# Altium footprint library iMX6 Rex Development Baseboard V1I1_PCB.PcbLib: 77 footprints (part 4 of 5)
Each footprint in its own frame and in the unit in brackets; x right, y up, seen from the top. Pads: shape width x height; smd on the part's side, far side on the other; paste and mask are expansions set on the pad; w line width, h text height; cw(c..) or ccw(c..) is an arc to the next point about the centre after c.
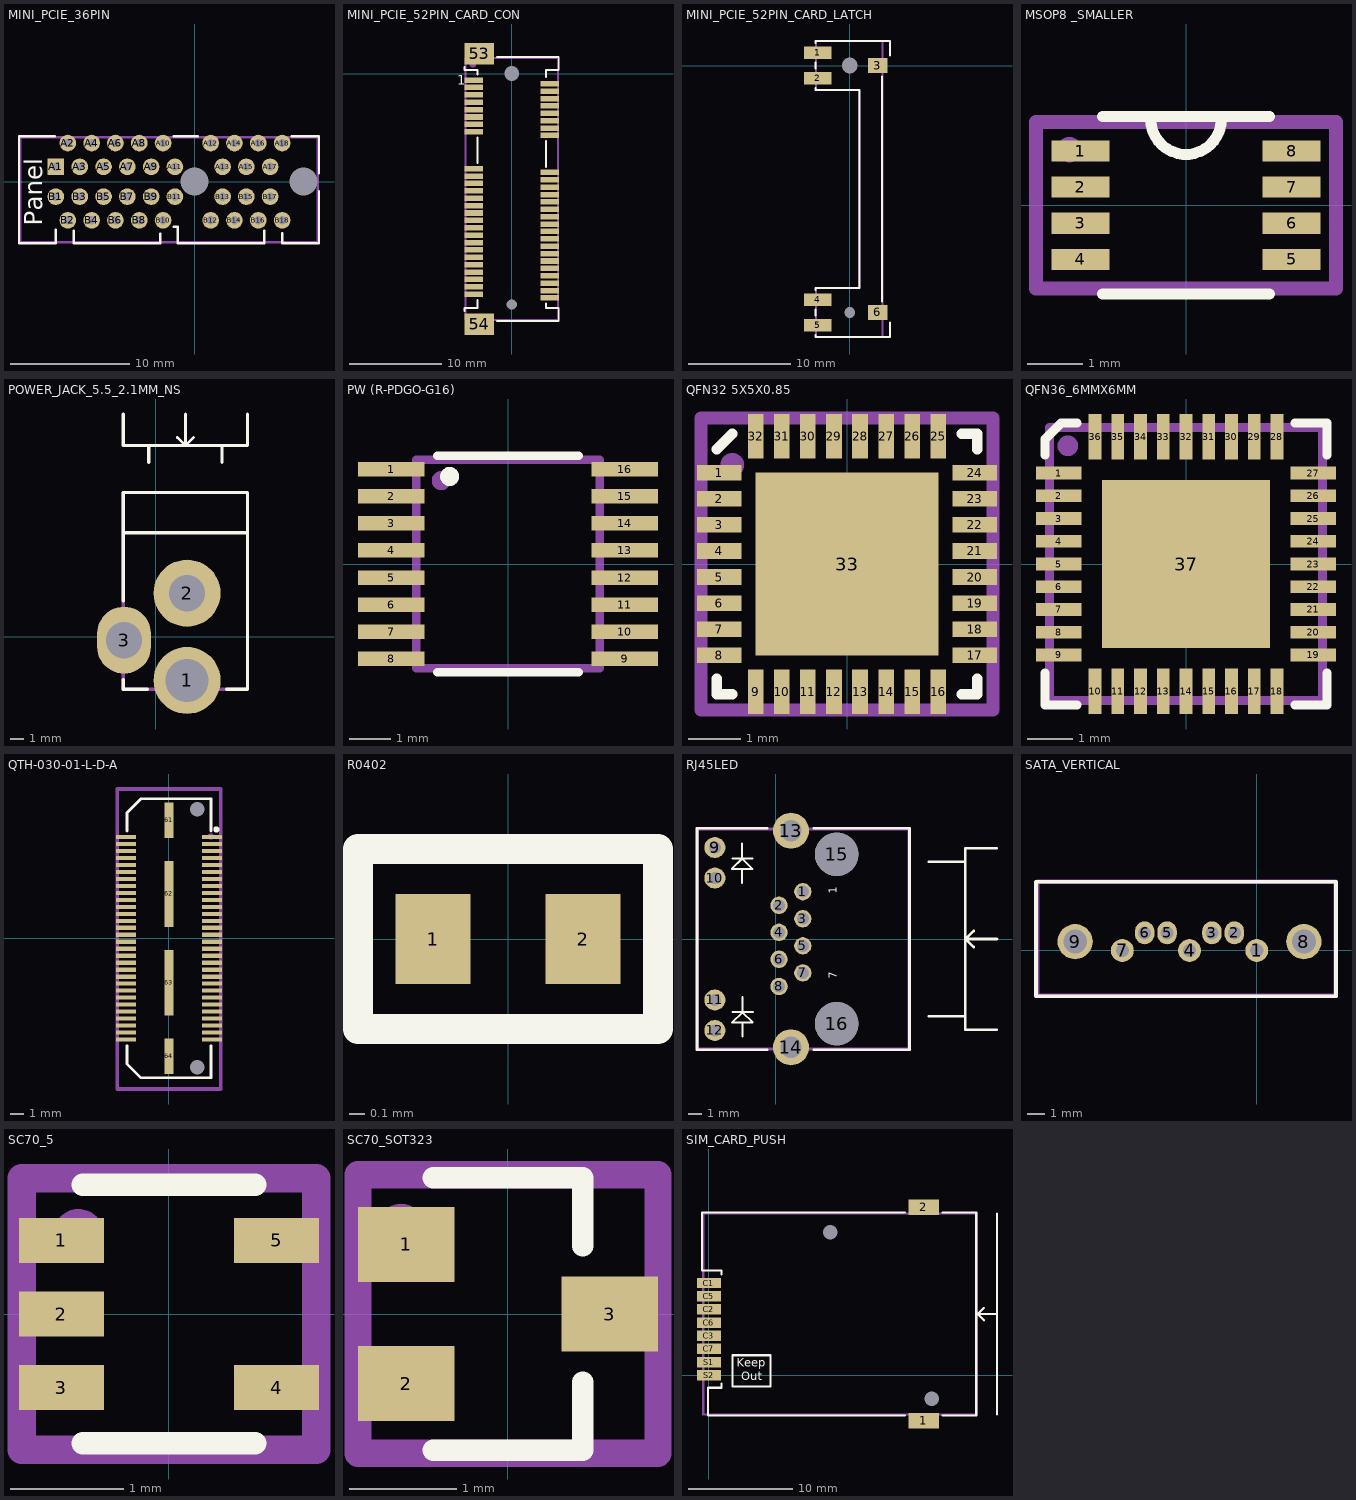
[diagram p3: the footprints below, top view; thin cyan lines are the x and y axes]

## MINI_PCIE_36PIN [mm]
pads (38):
  rrect70% 0x0 hole 2.35: 1(0,0) 2(9.15,0)
  rect 1.4x1.4 hole 0.7: A1(-11.65,1.25)
  round 1.4 hole 0.7: A2(-10.65,3.25) A3(-9.65,1.25) A4(-8.65,3.25) A5(-7.65,1.25) A6(-6.65,3.25) A7(-5.65,1.25) A8(-4.65,3.25) A9(-3.65,1.25) A10(-2.65,3.25) A11(-1.65,1.25) A12(1.35,3.25) A13(2.35,1.25) A14(3.35,3.25) A15(4.35,1.25) A16(5.35,3.25) A17(6.35,1.25) A18(7.35,3.25) B1(-11.65,-1.25) B2(-10.65,-3.25) B3(-9.65,-1.25) B4(-8.65,-3.25) B5(-7.65,-1.25) B6(-6.65,-3.25) B7(-5.65,-1.25) B8(-4.65,-3.25) B9(-3.65,-1.25) B10(-2.65,-3.25) B11(-1.65,-1.25) B12(1.35,-3.25) B13(2.35,-1.25) B14(3.35,-3.25) B15(4.35,-1.25) B16(5.35,-3.25) B17(6.35,-1.25) B18(7.35,-3.25)
Top Overlay:
  lines w0.2: -11.75,3.825 -14.75,3.825 -14.75,-5.175 -11.65,-5.175 -11.65,-4.025 ; -10.15,-4.125 -10.15,-5.175 -2.9,-5.175 -2.9,-4.375 ; -1.75,-3.775 -1.4,-3.775 -1.4,-5.175 5.85,-5.175 5.85,-4.125 ; -1.75,3.825 0.25,3.825 ; 7.35,-4.325 7.35,-5.175 10.45,-5.175 10.45,-0.8 ; 8.15,3.825 10.45,3.825 10.45,0.7
  text "Panel" at -12.8,-3.7 h1.5
Mechanical 16:
  lines w0.2: -14.65,-5.075 -14.65,3.725 10.35,3.725 10.35,-5.075 -14.65,-5.075
Mechanical 29:
  text ".Designator" at -0.5,0.3 h1.52
3D body "c-4-1612163-1-h-3d.stp": height 10, standoff -5.4, extent -14.65,-5.1 10.35,3.6

## MINI_PCIE_52PIN_CARD_CON [mm]
pads (56):
  rect 2x0.6 smd mask+0.05: 1(-4.1,-0.7) 2(4.1,-1.1) 3(-4.1,-1.5) 4(4.1,-1.9) 5(-4.1,-2.3) 6(4.1,-2.7) 7(-4.1,-3.1) 8(4.1,-3.5) 9(-4.1,-3.9) 10(4.1,-4.3) 11(-4.1,-4.7) 12(4.1,-5.1) 13(-4.1,-5.5) 14(4.1,-5.9) 15(-4.1,-6.3) 16(4.1,-6.7) 17(-4.1,-10.3) 18(4.1,-10.7) 19(-4.1,-11.1) 20(4.1,-11.5) 21(-4.1,-11.9) 22(4.1,-12.3) 23(-4.1,-12.7) 24(4.1,-13.1) 25(-4.1,-13.5) 26(4.1,-13.9) 27(-4.1,-14.3) 28(4.1,-14.7) 29(-4.1,-15.1) 30(4.1,-15.5) 31(-4.1,-15.9) 32(4.1,-16.3) 33(-4.1,-16.7) 34(4.1,-17.1) 35(-4.1,-17.5) 36(4.1,-17.9) 37(-4.1,-18.3) 38(4.1,-18.7) 39(-4.1,-19.1) 40(4.1,-19.5) 41(-4.1,-19.9) 42(4.1,-20.3) 43(-4.1,-20.7) 44(4.1,-21.1) 45(-4.1,-21.5) 46(4.1,-21.9) 47(-4.1,-22.3) 48(4.1,-22.7) 49(-4.1,-23.1) 50(4.1,-23.5) 51(-4.1,-23.9) 52(4.1,-24.3)
  rect 3.2x2.3 smd: 53(-3.5,2.15) 54(-3.5,-27.15)
  rrect70% 0x0 hole 1.6: 55(0,0)
  rrect70% 0x0 hole 1.1: 56(0,-25)
Top Overlay:
  lines w0.2: -5.1,-25.7 -5.1,-25.4 -3.7,-25.4 -3.7,-24.5 ; -5.1,0.7 -5.1,0.4 -3.7,0.4 -3.7,-0.1 ; -3.7,-9.7 -3.7,-6.9 ; -1.6,-26.8 5.1,-26.8 5.1,-25.4 3.7,-25.4 3.7,-24.9 ; -1.6,1.8 5.1,1.8 5.1,0.4 3.7,0.4 3.7,-0.4 ; 3.7,-10.1 3.7,-7.3
  text "1" at -5.9,-1.2 h1.02
Mechanical 16:
  circle w0.5: c-4.2,1 r0.1
  lines w0.2: -5,-26.7 5,-26.7 5,1.7 -5,1.7 -5,-26.7
Mechanical 29:
  text ".Designator" at -0.6,-10.9 h1.52
3D body "K3D-MM60-52B1-E1-R2 JAE Connector Division Proprietary.STEP": height 5.95, standoff -0.75, extent -5,-27.35 5,2.35

## MINI_PCIE_52PIN_CARD_LATCH [mm]
pads (8):
  rect 2.7x1.2 smd: 1(-3.15,1.25) 2(-3.15,-1.25) 4(-3.15,-22.95) 5(-3.15,-25.45)
  rect 1.9x1.5 smd: 3(2.75,0) 6(2.75,-24.2)
  rrect70% 0x0 hole 1.55: 7(0,0)
  rrect70% 0x0 hole 1.05: 8(0,-24.2)
Top Overlay:
  lines w0.2: -3.35,-26.4 -3.35,-26.6 3.95,-26.6 3.95,-25.2 ; -3.35,-24.5 -3.35,-23.9 ; -3.35,-22 -3.35,-21.8 0.95,-21.8 0.95,-2.4 -3.35,-2.4 -3.35,-2.2 ; -3.35,-0.3 -3.35,0.3 ; -3.35,2.2 -3.35,2.4 3.95,2.4 3.95,1 ; 3.15,-23.1 3.15,-1.1
Mechanical 16:
  lines w0.2: -3.3,-26.6 3.2,-26.6 3.2,2.4 -3.3,2.4 -3.3,-2.4 0.9,-2.4 0.9,-21.8 -3.3,-21.8 -3.3,-26.6
Mechanical 29:
  text ".Designator" at 1.5,-11.1 h1
3D body "K3D-MM60-EZH059-B5-R2 JAE Connector Division Proprietary.STEP": height 6.7, standoff -0.9, extent -3.95,-26.6 3.95,2.4

## MINI_PCIE_FULL CARD [mm]
3D body "PCI Express Mini Card (Full-Mini Card).step": height 6.9, standoff 2.15, extent 0,0 50.95,30

## MSOP8 _SMALLER [mm]
pads (8):
  rect 1.04x0.38 smd mask+0.076: 1(-1.9,0.975) 2(-1.9,0.325) 3(-1.9,-0.325) 4(-1.9,-0.975) 5(1.9,-0.975) 6(1.9,-0.325) 7(1.9,0.325) 8(1.9,0.975)
Top Overlay:
  lines w0.2: -1.5,-1.6 1.5,-1.6 ; -1.5,1.6 1.5,1.6 ; -0.635,1.549 ccw(c0,1.549) 0.635,1.549
Mechanical 16:
  circle w0.254: c-2.1,1 r0.1
  lines w0.254: -2.7,-1.5 2.7,-1.5 2.7,1.5 -2.7,1.5 -2.7,-1.5
Mechanical 29:
  text ".Designator" at 1,0.4 h1
3D body: height 0.9, standoff 0, extent -1.5,-1.6 1.5,1.6

## POWER_JACK_5.5_2.1MM_NS [mm]
pads (3):
  round 5 hole 3.2: 1(2.35,-3.25)
  round 5 hole 2.7: 2(2.35,3.25)
  oval 4x5 hole 2.7: 3(-2.35,-0.25)
Top Overlay:
  lines w0.2: 1.625,14.85 2.225,14.25 ; 2.225,16.6 2.225,14.25 ; 2.825,14.85 2.225,14.25
  lines w0.254: -2.4,-3.2 -2.4,-3.9 -0.6,-3.9 ; -2.4,2.7 -2.4,10.75 6.85,10.75 6.85,-3.9 5.3,-3.9 ; -2.4,7.75 6.85,7.75 ; -2.4,16.6 -2.4,14.25 6.85,14.25 6.85,16.6 ; -0.5,13 -0.5,14.25 ; 4.95,13 4.95,14.25
Mechanical 16:
  lines w0.254: -2.4,-3.9 -2.4,10.75 6.85,10.75 6.85,-3.9 -2.4,-3.9
Mechanical 29:
  text ".Designator" at -0.27,1.34 h1.52
3D body "CUI-PJ-002AH.step": height 11, standoff -3.5, extent -2.55,-3.9 6.85,10.5

## PW (R-PDGO-G16) [mm]
pads (16):
  rect 1.6x0.35 smd mask+0.07: 1(-2.8,2.275) 2(-2.8,1.625) 3(-2.8,0.975) 4(-2.8,0.325) 5(-2.8,-0.325) 6(-2.8,-0.975) 7(-2.8,-1.625) 8(-2.8,-2.275) 9(2.8,-2.275) 10(2.8,-1.625) 11(2.8,-0.975) 12(2.8,-0.325) 13(2.8,0.325) 14(2.8,0.975) 15(2.8,1.625) 16(2.8,2.275)
Top Overlay:
  circle w0.254: c-1.4,2.1 r0.1
  lines w0.2: -1.7,-2.6 1.7,-2.6 ; -1.7,2.6 1.7,2.6
Mechanical 16:
  circle w0.254: c-1.6,2 r0.1
  lines w0.2: -2.2,-2.5 -2.2,2.5 2.2,2.5 2.2,-2.5 -2.2,-2.5
Mechanical 29:
  text ".Designator" at 0.7,0.5 h1
3D body "mtc16.stp": height 0.99, standoff -0.01, extent -3.198,-2.5 3.222,2.5

## QFN32 5X5X0.85 [mm]
pads (33):
  rect 0.85x0.3 smd mask+0.025: 1(-2.45,1.75) 2(-2.45,1.25) 3(-2.45,0.75) 4(-2.45,0.25) 5(-2.45,-0.25) 6(-2.45,-0.75) 7(-2.45,-1.25) 8(-2.45,-1.75) 17(2.45,-1.75) 18(2.45,-1.25) 19(2.45,-0.75) 20(2.45,-0.25) 21(2.45,0.25) 22(2.45,0.75) 23(2.45,1.25) 24(2.45,1.75)
  rect 0.3x0.85 smd mask+0.025: 9(-1.75,-2.45) 10(-1.25,-2.45) 11(-0.75,-2.45) 12(-0.25,-2.45) 13(0.25,-2.45) 14(0.75,-2.45) 15(1.25,-2.45) 16(1.75,-2.45) 25(1.75,2.45) 26(1.25,2.45) 27(0.75,2.45) 28(0.25,2.45) 29(-0.25,2.45) 30(-0.75,2.45) 31(-1.25,2.45) 32(-1.75,2.45)
  rect 3.5x3.5 smd paste-10 mask+0.025: 33(0,0)
Top Overlay:
  lines w0.2: -2.5,-2.2 -2.5,-2.5 -2.2,-2.5 ; -2.5,2.2 -2.2,2.5 ; 2.2,-2.5 2.5,-2.5 2.5,-2.2 ; 2.2,2.5 2.5,2.5 2.5,2.2
Top Paste:
  rectangle: -1.7,0.1 -0.1,1.7
  region: 0.1,1.7 0.1,0.1 1.7,0.1 1.7,1.7
  region: -0.1,-1.7 -0.1,-0.1 -1.7,-0.1 -1.7,-1.7
  region: 1.7,-0.1 0.1,-0.1 0.1,-1.7 1.7,-1.7
Mechanical 16:
  circle w0.254: c-2.2,1.9 r0.1
  lines w0.254: -2.8,-2.8 -2.8,2.8 2.8,2.8 2.8,-2.8 -2.8,-2.8
Mechanical 29:
  text ".Designator" at 0.5,-1.2 h1.2
3D body: height 0.9, standoff 0, extent -2.5,-2.5 2.5,2.5

## QFN36_6MMX6MM [mm]
pads (37):
  rect 1x0.28 smd mask+0.025: 1(-2.8,2) 2(-2.8,1.5) 3(-2.8,1) 4(-2.8,0.5) 5(-2.8,0) 6(-2.8,-0.5) 7(-2.8,-1) 8(-2.8,-1.5) 9(-2.8,-2) 19(2.8,-2) 20(2.8,-1.5) 21(2.8,-1) 22(2.8,-0.5) 23(2.8,0) 24(2.8,0.5) 25(2.8,1) 26(2.8,1.5) 27(2.8,2)
  rect 0.28x1 smd mask+0.025: 10(-2,-2.8) 11(-1.5,-2.8) 12(-1,-2.8) 13(-0.5,-2.8) 14(0,-2.8) 15(0.5,-2.8) 16(1,-2.8) 17(1.5,-2.8) 18(2,-2.8) 28(2,2.8) 29(1.5,2.8) 30(1,2.8) 31(0.5,2.8) 32(0,2.8) 33(-0.5,2.8) 34(-1,2.8) 35(-1.5,2.8) 36(-2,2.8)
  rect 3.7x3.7 smd paste-10 mask+0.025: 37(0,0)
Top Overlay:
  lines w0.2: -3.1,-2.4 -3.1,-3.1 -2.4,-3.1 ; -3.1,2.4 -3.1,2.75 -2.75,3.1 -2.4,3.1 ; 2.4,-3.1 3.1,-3.1 3.1,-2.4 ; 2.4,3.1 3.1,3.1 3.1,2.4
Top Paste:
  rectangle: -1.7,0.1 -0.1,1.7
  region: -0.1,-1.7 -0.1,-0.1 -1.7,-0.1 -1.7,-1.7
  region: 1.7,-0.1 0.1,-0.1 0.1,-1.7 1.7,-1.7
  region: 0.1,1.7 0.1,0.1 1.7,0.1 1.7,1.7
Mechanical 16:
  circle w0.254: c-2.6,2.6 r0.1
  lines w0.2: -3,-3 -3,3 3,3 3,-3 -3,-3
Mechanical 29:
  text ".Designator" at -1.2,-0.6 h1.2
3D body "QFN36 (6x6).step": height 0.9, standoff 0.01, extent -3.103,-3.103 3.102,3.102

## QTH-030-01-L-D-A [mm]
pads (66):
  rect 1.45x0.3 smd mask+0.025: 1(3.09,7.25) 2(-3.09,7.25) 3(3.09,6.75) 4(-3.09,6.75) 5(3.09,6.25) 6(-3.09,6.25) 7(3.09,5.75) 8(-3.09,5.75) 9(3.09,5.25) 10(-3.09,5.25) 11(3.09,4.75) 12(-3.09,4.75) 13(3.09,4.25) 14(-3.09,4.25) 15(3.09,3.75) 16(-3.09,3.75) 17(3.09,3.25) 18(-3.09,3.25) 19(3.09,2.75) 20(-3.09,2.75) 21(3.09,2.25) 22(-3.09,2.25) 23(3.09,1.75) 24(-3.09,1.75) 25(3.09,1.25) 26(-3.09,1.25) 27(3.09,0.75) 28(-3.09,0.75) 29(3.09,0.25) 30(-3.09,0.25) 31(3.09,-0.25) 32(-3.09,-0.25) 33(3.09,-0.75) 34(-3.09,-0.75) 35(3.09,-1.25) 36(-3.09,-1.25) 37(3.09,-1.75) 38(-3.09,-1.75) 39(3.09,-2.25) 40(-3.09,-2.25) 41(3.09,-2.75) 42(-3.09,-2.75) 43(3.09,-3.25) 44(-3.09,-3.25) 45(3.09,-3.75) 46(-3.09,-3.75) 47(3.09,-4.25) 48(-3.09,-4.25) 49(3.09,-4.75) 50(-3.09,-4.75) 51(3.09,-5.25) 52(-3.09,-5.25) 53(3.09,-5.75) 54(-3.09,-5.75) 55(3.09,-6.25) 56(-3.09,-6.25) 57(3.09,-6.75) 58(-3.09,-6.75) 59(3.09,-7.25) 60(-3.09,-7.25)
  rect 0.64x2.54 smd mask+0.025: 61(0,8.445) 64(0,-8.445)
  rect 0.64x4.7 smd mask+0.025: 62(0,3.175) 63(0,-3.175)
  round 0 hole 1.05 unplated: 65(2.03,-9.24) 66(2.03,9.24)
Top Overlay:
  circle w0.254: c3.4,7.8 r0.1
  lines w0.2: -3,-7.7 -3,-9 -2,-10 3,-10 3,-7.7 ; -3,7.7 -3,9 -2,10 3,10 3,7.7
Mechanical 16:
  circle w0.254: c3,7.3 r0.1
  lines w0.254: -3.7,-10.8 -3.7,10.7 3.7,10.7 3.7,-10.8 -3.7,-10.8
Mechanical 29:
  text ".Designator" at 1.2,0 h1.52
3D body "QTH-030-01-X-D-A.step": height 4.26, standoff -0.74, extent -3.55,-10.002 3.562,10

## R0402 [mm]
pads (2):
  rect 0.5x0.6 smd: 1(-0.5,0) 2(0.5,0)
Top Overlay:
  lines w0.2: -1,-0.6 -1,0.6 1,0.6 1,-0.6 -1,-0.6
Mechanical 16:
  lines w0.15: -1,-0.6 1,-0.6 1,0.6 -1,0.6 -1,-0.6
Mechanical 29:
  text ".Designator" at 2,0.2 h0.4
3D body "R0402.step": height 0.4, standoff 0, extent -0.5,-0.25 0.5,0.25

## RJ45LED [mm]
pads (16):
  round 1.3 hole 0.9: 1(2.03,3.55) 2(0.25,2.53) 3(2.03,1.52) 4(0.25,0.5) 5(2.03,-0.51) 6(0.25,-1.52) 7(2.03,-2.54) 8(0.25,-3.56)
  round 1.575 hole 0.9: 9(-4.57,6.86) 10(-4.57,4.57) 11(-4.57,-4.57) 12(-4.57,-6.86)
  round 2.7 hole 1.6: 13(1.14,8.13) 14(1.14,-8.13)
  round 3.25 hole 3.25 unplated: 15(4.57,6.35) 16(4.57,-6.35)
Top Overlay:
  lines w0.15: -3.26,6.04 -1.74,6.04 ; -3.24,-5.48 -1.72,-5.48 ; -2.53,4.22 -2.53,5.26 ; -2.53,7.15 -2.53,6.03 -1.76,5.26 -3.29,5.26 -2.51,6.04 ; -2.51,-7.3 -2.51,-6.26 ; -2.51,-4.37 -2.51,-5.49 -1.74,-6.26 -3.27,-6.26 -2.49,-5.48
  lines w0.2: -0.66,-8.3 -5.91,-8.3 -5.91,8.3 -0.66,8.3 ; 2.86,-8.3 10.03,-8.3 10.03,8.3 2.86,8.3 ; 11.5,-5.8 14.23,-5.8 ; 11.5,5.8 14.23,5.8 ; 14.85,-0.6 14.25,0 ; 14.85,0.6 14.25,0 ; 16.58,-6.8 14.23,-6.8 14.23,6.8 16.58,6.8 ; 16.6,0 14.25,0
  text "7" at 4.58,-3 h0.6
  text "1" at 4.58,3.4 h0.6
Mechanical 16:
  lines w0.254: -5.87,-8.25 9.93,-8.25 10.03,-8.15 10.03,8.25 -5.87,8.25 -5.87,-8.25
Mechanical 29:
  text ".Designator" at 0.5,2 h1.52
3D body "c-2-406549-1-r4-3d.stp": height 14.8, standoff -3.92, extent -5.9,-9.3 10.821,9.328

## SATA_VERTICAL [mm]
pads (9):
  round 1.3 hole 0.74: 1(0,0) 4(-3.81,0) 7(-7.62,0)
  oval 1.1x1.3 hole 0.74: 2(-1.27,1) 3(-2.54,1) 5(-5.08,1) 6(-6.35,1)
  round 2 hole 1.35: 8(2.67,0.5) 9(-10.29,0.5)
Top Overlay:
  lines w0.2: -12.51,-2.6 -12.51,3.9 4.49,3.9 4.49,-2.6 -12.51,-2.6
Mechanical 16:
  lines w0.254: -12.43,-2.555 -12.43,3.895 4.47,3.895 4.47,-2.555 -12.43,-2.555
Mechanical 29:
  text ".Designator" at -5.5,-0.2 h1.52
3D body "471554001.stp": height 8.43, standoff -2.62, extent -12.43,-2.555 4.47,3.895

## SC70_5 [mm]
pads (5):
  rect 0.75x0.4 smd mask+0.025: 1(-0.95,0.65) 2(-0.95,0) 3(-0.95,-0.65) 4(0.95,-0.65) 5(0.95,0.65)
Top Overlay:
  lines w0.2: -0.762,-1.143 0.762,-1.143 ; -0.762,1.143 0.762,1.143
Mechanical 16:
  circle w0.254: c-0.8,0.7 r0.1
  lines w0.254: -1.3,-1.2 -1.3,1.2 1.3,1.2 1.3,-1.2 -1.3,-1.2
Mechanical 29:
  text ".Designator" at 0.4,-0.8 h0.6
3D body: height 0.8, standoff 0, extent 0.762,0.445 1.206,0.826
3D body: height 0.8, standoff 0, extent 0.762,-0.826 1.206,-0.445
3D body: height 0.8, standoff 0, extent -1.206,-0.826 -0.762,-0.445
3D body: height 0.8, standoff 0, extent -1.206,-0.191 -0.762,0.191
3D body: height 0.8, standoff 0, extent -1.206,0.445 -0.762,0.826
3D body: height 1.1, standoff 0, extent -0.762,-1.143 0.762,1.143

## SC70_SOT323 [mm]
pads (3):
  rect 0.9x0.7 smd: 1(-0.95,0.65) 2(-0.95,-0.65) 3(0.95,0)
Top Overlay:
  lines w0.2: -0.699,-1.27 0.699,-1.27 0.699,-0.635 ; -0.699,1.27 0.699,1.27 0.699,0.635
Mechanical 16:
  circle w0.254: c-1,0.8 r0.1
  lines w0.254: -1.4,-1.3 -1.4,1.3 1.4,1.3 1.4,-1.3 -1.4,-1.3
Mechanical 29:
  text ".Designator" at 0.3,-0.4 h0.6
3D body: height 0.75, standoff 0, extent 0.699,-0.318 1.27,0.381
3D body: height 0.75, standoff 0, extent -1.27,-1.016 -0.699,-0.318
3D body: height 0.75, standoff 0, extent -1.27,0.318 -0.699,1.016
3D body: height 1.1, standoff 0, extent -0.699,-1.27 0.699,1.27

## SIM_CARD_PUSH [mm]
pads (12):
  rect 2.95x1.5 smd: 1(20.7,-4.37) 2(20.7,16.18)
  rrect70% 0x0 hole 1.4: 3(21.47,-2.26) 4(11.67,13.79)
  rect 2.3x1 smd mask+0.051: C1(0,8.89) C2(0,6.35) C3(0,3.81) C5(0,7.62) C6(0,5.08) C7(0,2.54) S1(0,1.27) S2(0,0)
Top Overlay:
  lines w0.2: 1.19,9.71 1.19,10.1 -0.65,10.1 -0.65,15.68 18.9,15.68 ; 1.2,-0.8 1.2,-1.2 -0.1,-1.2 -0.1,-3.87 18.9,-3.87 ; 22.5,-3.87 25.75,-3.87 25.75,15.68 22.5,15.68 ; 26.5,5.3 25.9,5.9 ; 26.5,6.5 25.9,5.9 ; 27.75,-3.77 27.75,15.58 ; 27.75,5.9 25.9,5.9 ; 2.25,-1.07 2.25,1.93 5.95,1.93 5.95,-1.07 2.25,-1.07
  text "Out" at 3.1,-0.5 h0.8
  text "Keep" at 2.7,0.8 h0.8
Mechanical 16:
  lines w0.2: -0.55,-3.77 -0.55,15.58 25.75,15.58 25.75,-3.77 -0.55,-3.77
Mechanical 29:
  text ".Designator" at 14.5,6 h1.52
3D body "475531001.stp": height 1.8, standoff -0.7, extent -0.55,-4.6 25.95,16.35